# Altium schematic symbol library Dual.SchLib: 1 symbol
Pins are listed as number, name and electrical type; pins without a type are passive.

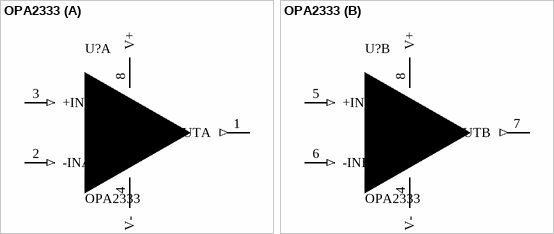
[diagram p0: symbol OPA2333]

## OPA2333
designator U?
Dual op-amp, two parts
footprint SOIC8
pins on every part: 4 V- (power), 8 V+ (power)
part A pins: 1 OUTA (out), 2 -INA (in), 3 +INA (in)
part B pins: 5 +INB (in), 6 -INB (in), 7 OUTB (out)
1 alternate drawing of the same symbol